# Altium schematic symbol library PTZ.SchLib: 104 symbols (part 1 of 4)
Pins are listed as number, name and electrical type; pins without a type are passive.

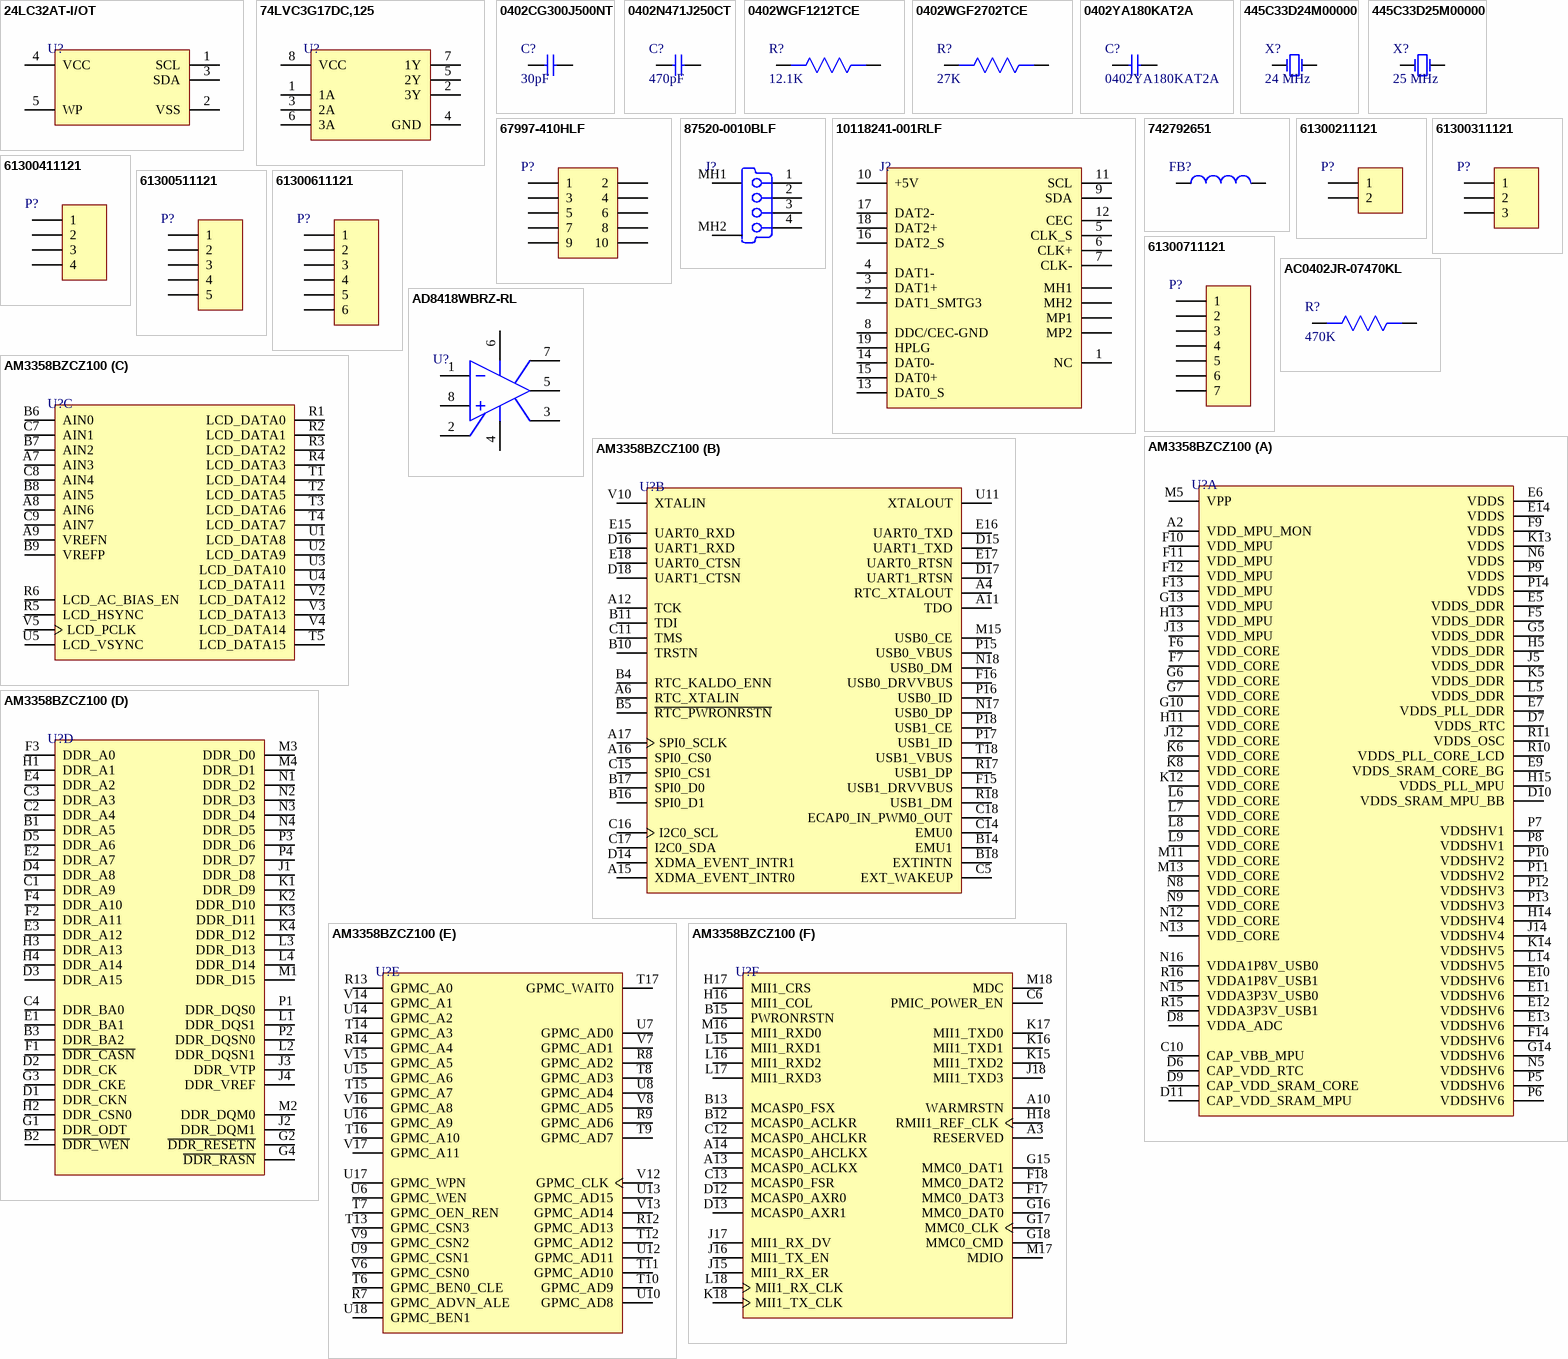
[diagram p0: symbols 24LC32AT-I/OT to AM3358BZCZ100]

## 24LC32AT-I/OT
designator U?
IC EEPROM 32KBIT 400KHZ SOT23-5; Manufacturer: Microchip; Manufacturer Part Number: 24LC32AT-I/OT; Min Supply Voltage: 2.5V; Max Supply Voltage: 5.5V; Interface: I2C,Serial; Access Time: 900ns; Density: 32Kb; Nominal Supply Current: 3mA; Organization: 4KX8; Write Protection: YES; Write Cycle Time-Max (tWC): 5ms; Operating Supply Voltage: 5V; Supplier 1: Newark; RoHS: Yes; Category: EEPROM; Pricing 1: 1=0.43000, 25=0.42400, 50=0.42200, 100=0.42000 (USD); Mount: Surface Mount; Case/Package: SOT-23; Number of Pins: 5; Contact Plating: Tin,Matte; Min Operating Temperature: -40°C; Max Operating Temperature: 85°C; Frequency: 400kHz; Packaging: Tape and Reel; Package Quantity: 3000; Memory Type: EEPROM; Memory Size: 32Kb; Max Frequency: 400kHz; Access Time-Max: 900ns; Programming Voltage: 5.5V; Supply Current: 3mA; Supply Voltage-Nom: 5.5V; Termination: SMD/SMT; Length: 3.1mm; Width: 1.8mm; Height: 1.3mm; Radiation Hardening: No; REACH SVHC: No SVHC; Lead Free: Lead Free; RoHS Compliant: Yes; ComponentLink1URL: https://datasheet.ciiva.com/1155/1688094-1155269.pdf?src-supplier=Element14; ComponentLink1Description: https://datasheet.ciiva.com/1155/1688094-1155269.pdf?src-supplier=Element14; ComponentLink2URL: https://datasheet.ciiva.com/22715/1669362-22715182.pdf?src-supplier=Element14; ComponentLink2Description: https://datasheet.ciiva.com/22715/1669362-22715182.pdf?src-supplier=Element14; ComponentLink3URL: https://datasheet.ciiva.com/14134/24aa32a-24lc32a-eng-tds-14134837.pdf?src-supplier=Distrelec; ComponentLink3Description: https://datasheet.ciiva.com/14134/24aa32a-24lc32a-eng-tds-14134837.pdf?src-supplier=Distrelec; ComponentLink4URL: https://datasheet.ciiva.com/46410/1669362-46410953.pdf?src-supplier=Element14; ComponentLink4Description: https://datasheet.ciiva.com/46410/1669362-46410953.pdf?src-supplier=Element14; ComponentLink5URL: https://datasheet.ciiva.com/16221/filehandler-aspxddocname-en011853-16221753.pdf?src-supplier=Future+Electronics; ComponentLink5Description: https://datasheet.ciiva.com/16221/filehandler-aspxddocname-en011853-16221753.pdf?src-supplier=Future+Electronics; ComponentLink6URL: https://datasheet.ciiva.com/26910/getdatasheetpartid-757926-26910554.pdf?src-supplier=Verical; ComponentLink6Description: https://datasheet.ciiva.com/26910/getdatasheetpartid-757926-26910554.pdf?src-supplier=Verical; Supplier Part Number 1: 08P0113
footprint SOT-23-5
pins: 1 SCL, 2 VSS, 3 SDA, 4 VCC, 5 WP

## 74LVC3G17DC,125
designator U?
IC BUFF SCHMT TRG TRPL 8VSSOP; Manufacturer: NXP Semiconductors; Manufacturer Part Number: 74LVC3G17DC125; Max Supply Voltage: 5.5V; Min Supply Voltage: 1.65V; Propagation Delay: 13.1ns; Low Level Output Current: 32mA; Number of Input Lines: 3; Polarity: Non-Inverting; Logic Function: Schmitt Trigger,Buffer; Number of Bits per Element: 1; Quiescent Current: 40uA; Supplier 1: Digi-Key; RoHS: Yes; Category: Clock Buffers, Drivers; Mount: Surface Mount; Case/Package: VSSOP; Number of Pins: 8; Contact Plating: Gold; Min Operating Temperature: -40°C; Max Operating Temperature: 125°C; Packaging: Tape and Reel; Package Quantity: 3000; Number of Output Lines: 3; High Level Output Current: 32mA; Number of Channels: 3; Number of Inputs: 3; Number of Outputs: 3; Number of Elements: 3; Turn-On Delay Time: 13.1ns; Series: 74LVC; Technology: CMOS; Radiation Hardening: No; Lead Free: Lead Free; ComponentLink1URL: https://datasheet.ciiva.com/1839/74lvc3g17-1839116.pdf?src-supplier=Digi-Key; ComponentLink1Description: https://datasheet.ciiva.com/1839/74lvc3g17-1839116.pdf?src-supplier=Digi-Key; ComponentLink2URL: https://datasheet.ciiva.com/1839/74lvc3g17-1839115.pdf?src-supplier=Digi-Key; ComponentLink2Description: https://datasheet.ciiva.com/1839/74lvc3g17-1839115.pdf?src-supplier=Digi-Key; ComponentLink3URL: https://datasheet.ciiva.com/1839/74lvc3g17-1839117.pdf?src-supplier=Digi-Key; ComponentLink3Description: https://datasheet.ciiva.com/1839/74lvc3g17-1839117.pdf?src-supplier=Digi-Key; ComponentLink4URL: https://datasheet.ciiva.com/8260/74lvc3g17-8260965.pdf?src-supplier=Avnet; ComponentLink4Description: https://datasheet.ciiva.com/8260/74lvc3g17-8260965.pdf?src-supplier=Avnet; Supplier Part Number 1: 568-9369-2-ND
footprint 8-VSSOP
pins: 1 1A, 2 3Y, 3 2A, 4 GND, 5 2Y, 6 3A, 7 1Y, 8 VCC

## 0402CG300J500NT
designator C?, comment 30pF
50V 30pF C0G ±5% 0402 SMD/SMT ROHS; Manufacturer: FH; Manufacturer Part Number: 0402CG300J500NT; Footprint: 0402; Value: 30pF; ComponentLink1Description: LCSC; ComponentLink1URL: https://lcsc.com/product-detail/Multilayer-Ceramic-Capacitors-MLCC-SMD-SMT_FH-Guangdong-Fenghua-Advanced-Tech-0402CG300J500NT_C1570.html
footprint Cap0402
pins: 1, 2

## 0402N471J250CT
designator C?, comment 470pF
25V 470pF NP0 ±5% 0402 SMD/SMT ROHS; Manufacturer: Walsin; Manufacturer Part Number: 0402N471J250CT; Footprint: 0402
footprint Cap0402
pins: 1, 2

## 0402WGF1212TCE
designator R?, comment 12.1K
62.5mW Thick Film Resistors 50V 12.1kΩ 0402 ROHS; Manufacturer: UNI-ROYAL; Manufacturer Part Number: 0402WGF1212TCE; Footprint: 0402; ComponentLink1Description: LCSC; ComponentLink1URL: https://lcsc.com/product-detail/Chip-Resistor-Surface-Mount_UNI-ROYAL-Uniroyal-Elec-0402WGF1212TCE_C25852.html; Value: 12.1K
footprint Res0402
pins: 1, 2

## 0402WGF2702TCE
designator R?, comment 27K
62.5mW T 50V 27kΩ 0402  ROHS; Manufacturer: Royal Electronic Factory; Manufacturer Part Number: 0402WGF2702TCE; Supplier 1: Mouser; RoHS: No; Stock 1: 200000; Pricing 1: 10000=0.00400 (USD); Supplier Part Number 1: 303-0402WGF2702TCE
footprint Res0402
pins: 1, 2

## 0402YA180KAT2A
designator C?
CAP CER 18PF 16V NP0 0402; Manufacturer: Kyocera AVX; Tolerance: 10%; Dielectric: C0G; Supplier 1: Digi-Key; Manufacturer Part Number: 0402YA180KAT2A; RoHS: Yes; Category: Ceramic Capacitors; Stock 1: 28789; Pricing 1: 1=0.10000, 10=0.03000, 50=0.01640, 100=0.01350, 500=0.00962, 1000=0.00756, 2500=0.00688, 5000=0.00632 (USD); Mount: Surface Mount; Case/Package: 0402; Number of Pins: 2; Case Code (Metric): 1005; Case Code (Imperial): 0402; Weight: 2.3E-05oz; Min Operating Temperature: -55°C; Max Operating Temperature: 125°C; Capacitance: 18pF; Voltage Rating: 16V; Packaging: Tape and Reel; Package Quantity: 10000; Voltage Rating (DC): 16V; Termination: SMD/SMT; Length: 1mm; Width: 0.02inch; Height: 0.56mm; Thickness: 0.022inch; Depth: 0.5mm; Radiation Hardening: No; REACH SVHC: Unknown; ComponentLink1URL: https://datasheet.ciiva.com/206/ccog-206568.pdf?src-supplier=Digi-Key; ComponentLink1Description: https://datasheet.ciiva.com/206/ccog-206568.pdf?src-supplier=Digi-Key; ComponentLink2URL: https://datasheet.ciiva.com/5444/ccog-243403-5444889.pdf?src-supplier=Mouser; ComponentLink2Description: https://datasheet.ciiva.com/5444/ccog-243403-5444889.pdf?src-supplier=Mouser; ComponentLink3URL: https://datasheet.ciiva.com/11568/ccog-11568446.pdf?src-supplier=Avnet; ComponentLink3Description: https://datasheet.ciiva.com/11568/ccog-11568446.pdf?src-supplier=Avnet; Supplier Part Number 1: 478-0402YA180KAT2ACT-ND
footprint Cap0402
pins: 1, 2

## 445C33D24M00000
designator X?, comment 24 MHz
CRYSTAL 24.0000MHZ 18PF SMD; Manufacturer: CTS; Manufacturer Part Number: 445C33D24M00000; ESR (Equivalent Series Resistance): 40R; Frequency: 24MHz; Tolerance: 30ppm; Supplier 1: Avnet; RoHS: Yes; Category: Crystals; Stock 1: 20000; Pricing 1: 1000=0.32918, 2000=0.32482, 4000=0.30956, 6000=0.26496, 8000=0.25920, 10000=0.23100, 100000=0.22575 (USD); Mount: Surface Mount; Case/Package: SMD/SMT; Number of Pins: 2; Contact Plating: Gold; Min Operating Temperature: -20°C; Max Operating Temperature: 70°C; Load Capacitance: 18pF; Package Quantity: 1000; Packaging: Tape and Reel; Frequency Tolerance: 30ppm; Frequency Stability: 30ppm; Termination: SMD/SMT; Series Resistance: 40R; Series: 445; Length: 0.197inch; Width: 3.2mm; Height: 0.053inch; RoHS Compliant: Yes; ComponentLink1URL: https://datasheet.ciiva.com/29893/008-0360-0-29893750.pdf?src-supplier=Avnet; ComponentLink1Description: https://datasheet.ciiva.com/29893/008-0360-0-29893750.pdf?src-supplier=Avnet; Supplier Part Number 1: 445C33D24M00000
footprint 445C33D24M00000
pins: 1, 2 Out/IN

## 445C33D25M00000
designator X?, comment 25 MHz
CRYSTAL 25.0000MHZ 18PF SMD; Manufacturer: CTS; Manufacturer Part Number: 445C33D25M00000; Frequency: 25MHz; Frequency Tolerance: 30ppm; ESR (Equivalent Series Resistance): 40R; Supplier 1: Mouser; RoHS: Yes; Category: Crystals; Stock 1: 5341; Pricing 1: 1=0.58000, 10=0.48000, 50=0.48000, 100=0.38400, 1000=0.30700, 10000=0.30700 (USD); Mount: Surface Mount; Case/Package: SMD/SMT; Number of Pins: 2; Contact Plating: Gold; Min Operating Temperature: -20°C; Max Operating Temperature: 70°C; Package Quantity: 1000; Load Capacitance: 18pF; Packaging: Tape and Reel; Tolerance: 30ppm; Frequency Stability: 30ppm; Termination: SMD/SMT; Series Resistance: 40R; Series: 445; Length: 0.197inch; Width: 0.126inch; Height: 0.053inch; Lead Free: Lead Free; RoHS Compliant: Yes; ComponentLink1URL: https://datasheet.ciiva.com/29893/008-0360-0-29893752.pdf?src-supplier=Avnet; ComponentLink1Description: https://datasheet.ciiva.com/29893/008-0360-0-29893752.pdf?src-supplier=Avnet; Supplier Part Number 1: 774-445C33D25M00000
footprint 445C33D25M00000
pins: 1, 2 Out/IN

## 67997-410HLF
designator P?
CONN HEADER VERT 10POS 2.54MM; Manufacturer: Amphenol FCI; Manufacturer Part Number: 67997-410HLF; Number of Contacts: 10; Current Rating: 3A; Voltage Rating: 1.5kV; Insulation Resistance: 5GR; Gender: Male; Connector Type: Male Pin; Contact Post Length: 3.05mm; Row Spacing: 0.1inch; Supplier 1: Digi-Key; Stock 1: 7926; Pricing 1: 1=0.28, 10=0.266, 100=0.1864, 500=0.15982, 1000=0.13318, 5000=0.11415, 10000=0.10654 (USD); Mount: Through Hole; Contact Plating: Tin; Contact Material: Bronze; Color: Black; Housing Color: Black; Housing Material: Thermoplastic; Min Operating Temperature: -65°C; Max Operating Temperature: 125°C; Number of Rows: 2; Termination: Solder; Contact Gender: Male; Package Quantity: 100; Packaging: Bulk; Number of Positions: 10; Max Voltage Rating (AC): 1.5kV; Orientation: Straight; Length: 12.7mm; Pitch: 2.54mm; Contact Mating Length: 0.23inch; Depth: 4.83mm; REACH SVHC: No SVHC; Flammability Rating: UL94 V-0; ComponentLink1URL: http://www.mouser.com/ds/2/154/bus-12-050-356030.pdf?src-supplier=Mouser; ComponentLink1Description: http://www.mouser.com/ds/2/154/bus-12-050-356030.pdf?src-supplier=Mouser; ComponentLink2URL: http://portal.fciconnect.com/Comergent/fci/drawing/67996.pdf?src-supplier=Avnet; ComponentLink2Description: http://portal.fciconnect.com/Comergent/fci/drawing/67996.pdf?src-supplier=Avnet; ComponentLink3URL: https://www.alliedelec.com/m/d/738c41368b909dba4b47243c40762f88.pdf?src-supplier=Allied+Electronics; ComponentLink3Description: https://www.alliedelec.com/m/d/738c41368b909dba4b47243c40762f88.pdf?src-supplier=Allied+Electronics; ComponentLink4URL: https://cdn.amphenol-icc.com/media/wysiwyg/files/drawing/67996.pdf?src-supplier=Digi-Key; ComponentLink4Description: https://cdn.amphenol-icc.com/media/wysiwyg/files/drawing/67996.pdf?src-supplier=Digi-Key; ComponentLink5URL: http://portal.fciconnect.com/Comergent/fci/drawing/67996.pdf?src-supplier=Avnet+Europe; ComponentLink5Description: http://portal.fciconnect.com/Comergent/fci/drawing/67996.pdf?src-supplier=Avnet+Europe; ComponentLink6URL: http://www.farnell.com/datasheets/1748781.pdf?src-supplier=Element14; ComponentLink6Description: http://www.farnell.com/datasheets/1748781.pdf?src-supplier=Element14; Supplier Part Number 1: 609-3243-ND
footprint HDR2X5 (Connector; Header; 5x2 Position)
pins: 1, 2, 3, 4, 5, 6, 7, 8, 9, 10

## 87520-0010BLF
designator J?
CONN RCPT USB2.0 TYPEA 4POS R/A; Manufacturer: Amphenol ICC / FCI; Manufacturer Part Number: 87520-0010BLF; Supplier 1: Newark; RoHS: No; Category: USB Connectors; Supplier Part Number 1: 08X5249
footprint 87520-0010BLF
pins: 1 V BUS (5V) "USB Vcc [Red]", 2 D- "USB Data - [White]", 3 D+ "USB Data + [Green]", 4 GND "Not Connected (or joined to pin 5 via resistor)", MH1 Tab "Shell", MH2 Tab "Shell"

## 10118241-001RLF
designator J?
CONN RCP MICRO HDMI 19POS SMD RA; Manufacturer: Amphenol ICC / FCI; Manufacturer Part Number: 10118241-001RLF; Supplier 1: Mouser; RoHS: Yes; Category: Audio / Video Connectors; Stock 1: 4894; Pricing 1: 1=1.44000, 10=1.18000, 50=1.18000, 100=1.12000, 1000=0.79700, 10000=0.76000 (USD); ComponentLink1URL: https://datasheet.ciiva.com/1095/10118241-1095058.pdf?src-supplier=Element14; ComponentLink1Description: https://datasheet.ciiva.com/1095/10118241-1095058.pdf?src-supplier=Element14; ComponentLink2URL: https://datasheet.ciiva.com/851/10118241-851179.pdf?src-supplier=Digi-Key; ComponentLink2Description: https://datasheet.ciiva.com/851/10118241-851179.pdf?src-supplier=Digi-Key; ComponentLink3URL: https://datasheet.ciiva.com/851/10118241-851180.pdf?src-supplier=Digi-Key; ComponentLink3Description: https://datasheet.ciiva.com/851/10118241-851180.pdf?src-supplier=Digi-Key; ComponentLink4URL: https://datasheet.ciiva.com/851/10118241-851181.pdf?src-supplier=Digi-Key; ComponentLink4Description: https://datasheet.ciiva.com/851/10118241-851181.pdf?src-supplier=Digi-Key; Supplier Part Number 1: 649-10118241-001RLF
footprint 10118241-001RLF
pins: 1 NC, 2 DAT1_SMTG3, 3 DAT1+, 4 DAT1-, 5 CLK_S, 6 CLK+, 7 CLK-, 8 DDC/CEC-GND, 9 SDA, 10 +5V, 11 SCL, 12 CEC, 13 DAT0_S, 14 DAT0-, 15 DAT0+, 16 DAT2_S, 17 DAT2-, 18 DAT2+, 19 HPLG, MH1, MH2, MP1, MP2

## 742792651
designator FB?
Ferrite Beads WE-CBF 0603 SMD Bead 100MHz 600Ohm 1000mA; Manufacturer: Wurth Electronics; Manufacturer Part Number: 742792651; Tolerance: 25%; Current Rating: 1A; Impedance: 600R; Number of Lines: 1; DC Resistance (DCR): 200mR; Inductance: 0.36H; Supplier 1: RSComponents; RoHS: Yes; Category: Ferrite Beads and Chips; Stock 1: 6200; Pricing 1: 50=0.13400, 500=0.12400, 2500=0.11200, 5000=0.10000, 12500=0.09000 (GBP); Mount: Surface Mount; Case/Package: SMD/SMT; Case Code (Metric): 1608; Case Code (Imperial): 0603; Material: Ferrite; Core Material: Ferrite; Weight: 0.000141oz; Min Operating Temperature: -55°C; Max Operating Temperature: 125°C; Package Quantity: 1; Packaging: Tape and Reel; Max Current Rating: 1A; Max DC Current: 1A; Termination: SMD/SMT; Test Frequency: 100MHz; Series: WE-CBF; Resistance: 200mR; Length: 1.6mm; Width: 0.8mm; Height: 0.8mm; Depth: 0.8mm; REACH SVHC: Unknown; RoHS Compliant: Yes; Lead Free: Lead Free; ComponentLink1URL: https://datasheet.ciiva.com/1475/1705833-1475349.pdf?src-supplier=Farnell; ComponentLink1Description: https://datasheet.ciiva.com/1475/1705833-1475349.pdf?src-supplier=Farnell; ComponentLink2URL: https://datasheet.ciiva.com/11803/0900766b80d2e079-11803680.pdf?src-supplier=RSComponents; ComponentLink2Description: https://datasheet.ciiva.com/11803/0900766b80d2e079-11803680.pdf?src-supplier=RSComponents; ComponentLink3URL: https://datasheet.ciiva.com/4940/742792651-72243-4940492.pdf?src-supplier=Mouser; ComponentLink3Description: https://datasheet.ciiva.com/4940/742792651-72243-4940492.pdf?src-supplier=Mouser; ComponentLink4URL: https://datasheet.ciiva.com/1013/742792651-1013527.pdf?src-supplier=Digi-Key; ComponentLink4Description: https://datasheet.ciiva.com/1013/742792651-1013527.pdf?src-supplier=Digi-Key; ComponentLink5URL: https://datasheet.ciiva.com/22711/1705833-22711420.pdf?src-supplier=Element14; ComponentLink5Description: https://datasheet.ciiva.com/22711/1705833-22711420.pdf?src-supplier=Element14; ComponentLink6URL: https://datasheet.ciiva.com/1013/742792651-1013528.pdf?src-supplier=Digi-Key; ComponentLink6Description: https://datasheet.ciiva.com/1013/742792651-1013528.pdf?src-supplier=Digi-Key; ComponentLink7URL: https://datasheet.ciiva.com/1013/742792651-1013529.pdf?src-supplier=Digi-Key; ComponentLink7Description: https://datasheet.ciiva.com/1013/742792651-1013529.pdf?src-supplier=Digi-Key; Supplier Part Number 1: 1241835
footprint IND 0603
pins: 1, 2

## 61300211121
designator P?
CONN HEADER VERT 2POS 2.54MM; Manufacturer: Wurth Electronics; Manufacturer Part Number: 61300211121; Current Rating: 3A; Voltage Rating: 250V; Number of Positions: 2; Gender: Male; Connector Type: Male Pin; Pitch: 0.1inch; Supplier 1: Digi-Key; Stock 1: 219205; Pricing 1: 1=0.13, 10=0.106, 25=0.088, 50=0.074, 100=0.067, 1000=0.061 (USD); Mount: Through Hole; Contact Plating: Gold; Housing Material: PBT; Contact Material: Copper Alloy,Copper; Color: Black; Min Operating Temperature: -40°C; Max Operating Temperature: 125°C; Number of Rows: 1; Contact Gender: Male; Packaging: Bulk; Termination: Through Hole; Number of Contacts: 2; Contact Mating Length: 0.236inch; REACH SVHC: Unknown; Lead Free: Lead Free; ComponentLink1URL: http://www.mouser.com/ds/2/445/6130xx11121-538006.pdf?src-supplier=Mouser; ComponentLink1Description: http://www.mouser.com/ds/2/445/6130xx11121-538006.pdf?src-supplier=Mouser; Supplier Part Number 1: 732-5315-ND
footprint HDR1X2 (CONN HEADER VERT 2POS 2.54MM)
pins: 1, 2

## 61300311121
designator P?
CONN HEADER VERT 3POS 2.54MM; Manufacturer: Wurth Electronics; Manufacturer Part Number: 61300311121; Number of Positions: 3; Gender: Male; Connector Type: Male Pin; Pitch: 0.1inch; Supplier 1: Digi-Key; Stock 1: 81286; Pricing 1: 1=0.13, 10=0.106, 25=0.088, 50=0.074, 100=0.067, 1000=0.061 (USD); Mount: Through Hole; Contact Plating: Gold; Contact Material: Copper; Color: Black; Number of Rows: 1; Packaging: Bulk; Termination: Solder; Number of Contacts: 3; Contact Mating Length: 0.236inch; REACH SVHC: Unknown; Lead Free: Lead Free; ComponentLink1URL: http://www.farnell.com/cad/1737268.pdf?src-supplier=Element14; ComponentLink1Description: http://www.farnell.com/cad/1737268.pdf?src-supplier=Element14; ComponentLink2URL: https://katalog.we-online.de/em/datasheet/6130xx11121.pdf?src-supplier=Digi-Key; ComponentLink2Description: https://katalog.we-online.de/em/datasheet/6130xx11121.pdf?src-supplier=Digi-Key; Supplier Part Number 1: 732-5316-ND
footprint HDR1X3 (Connector; Header; 3 Position)
pins: 1, 2, 3

## 61300411121
designator P?
CONN HEADER VERT 4POS 2.54MM; Manufacturer: Wurth Electronics; Manufacturer Part Number: 61300411121; Number of Positions: 4; Gender: Male; Connector Type: Male Pin; Pitch: 0.1inch; Supplier 1: Digi-Key; Stock 1: 20544; Pricing 1: 1=0.18, 10=0.153, 25=0.1272, 50=0.106, 100=0.096, 1000=0.088 (USD); Mount: Through Hole; Contact Plating: Gold; Contact Material: Copper; Color: Black; Number of Rows: 1; Packaging: Bulk; Termination: Solder; Number of Contacts: 4; Contact Mating Length: 0.236inch; REACH SVHC: Unknown; Lead Free: Lead Free; ComponentLink1URL: http://www.farnell.com/cad/1737268.pdf?src-supplier=Element14; ComponentLink1Description: http://www.farnell.com/cad/1737268.pdf?src-supplier=Element14; ComponentLink2URL: https://katalog.we-online.de/em/datasheet/6130xx11121.pdf?src-supplier=Digi-Key; ComponentLink2Description: https://katalog.we-online.de/em/datasheet/6130xx11121.pdf?src-supplier=Digi-Key; Supplier Part Number 1: 732-5317-ND
footprint HDR1X4 (Connector; Header; 4 Position)
pins: 1, 2, 3, 4

## 61300511121
designator P?
CONN HEADER VERT 5POS 2.54MM; Manufacturer: Wurth Electronics; Manufacturer Part Number: 61300511121; Number of Positions: 5; Gender: Male; Connector Type: Male Pin; Pitch: 0.1inch; Supplier 1: Digi-Key; Stock 1: 27960; Pricing 1: 1=0.25, 10=0.209, 25=0.174, 50=0.145, 100=0.132, 1000=0.12 (USD); Mount: Through Hole; Contact Plating: Gold; Contact Material: Copper; Color: Black; Number of Rows: 1; Packaging: Bulk; Termination: Solder; Number of Contacts: 5; Contact Mating Length: 0.236inch; REACH SVHC: Unknown; Lead Free: Lead Free; ComponentLink1URL: https://katalog.we-online.de/em/datasheet/6130xx11121.pdf?src-supplier=Digi-Key; ComponentLink1Description: https://katalog.we-online.de/em/datasheet/6130xx11121.pdf?src-supplier=Digi-Key; ComponentLink2URL: http://www.farnell.com/cad/1737268.pdf?src-supplier=Element14; ComponentLink2Description: http://www.farnell.com/cad/1737268.pdf?src-supplier=Element14; Supplier Part Number 1: 732-5318-ND
footprint HDR1X5 (Connector; Header; 5 Position)
pins: 1, 2, 3, 4, 5

## 61300611121
designator P?
CONN HEADER 6 POS 2.54; Manufacturer: Wurth Electronics; Manufacturer Part Number: 61300611121; Current Rating: 3A; Voltage Rating: 250V; Number of Positions: 6; Gender: Male; Connector Type: Male Pin; Pitch: 0.1inch; Supplier 1: Newark; RoHS: Yes; Category: Headers and Wire Housings; Stock 1: 4996; Pricing 1: 1=0.34000, 10=0.28900, 25=0.24000, 50=0.20100, 100=0.18200 (USD); Mount: Through Hole; Contact Plating: Gold; Contact Material: Copper Alloy,Copper; Housing Material: PBT; Color: Black; Min Operating Temperature: -40°C; Max Operating Temperature: 125°C; Number of Rows: 1; Contact Gender: Male; Packaging: Bulk; Termination: Through Hole; Number of Contacts: 6; Series: WR-PHD; Contact Type: Male Pin; Contact Mating Length: 0.236inch; REACH SVHC: Unknown; Lead Free: Lead Free; RoHS Compliant: Yes; ComponentLink1URL: http://www.mouser.com/ds/2/445/6130xx11121-538006.pdf?src-supplier=Mouser; ComponentLink1Description: http://www.mouser.com/ds/2/445/6130xx11121-538006.pdf?src-supplier=Mouser; ComponentLink2URL: http://www.farnell.com/cad/1737268.pdf?src-supplier=Element14; ComponentLink2Description: http://www.farnell.com/cad/1737268.pdf?src-supplier=Element14; ComponentLink3URL: https://katalog.we-online.de/em/datasheet/6130xx11121.pdf?src-supplier=Digi-Key; ComponentLink3Description: https://katalog.we-online.de/em/datasheet/6130xx11121.pdf?src-supplier=Digi-Key; Supplier Part Number 1: 20X0957
footprint HDR1X6 (Connector; Header; 6 Position)
pins: 1, 2, 3, 4, 5, 6

## 61300711121
designator P?
CONN HEADER VERT 7POS 2.54MM; Manufacturer: Wurth Electronics; Manufacturer Part Number: 61300711121; Number of Positions: 7; Gender: Male; Connector Type: Male Pin; Pitch: 0.1inch; Supplier 1: Digi-Key; Stock 1: 4017; Pricing 1: 1=0.37, 10=0.315, 25=0.2632, 50=0.219, 100=0.199, 1000=0.181 (USD); Mount: Through Hole; Contact Plating: Gold; Contact Material: Copper; Color: Black; Number of Rows: 1; Packaging: Bulk; Termination: Solder; Number of Contacts: 7; Contact Mating Length: 0.236inch; REACH SVHC: Unknown; ComponentLink1URL: https://katalog.we-online.de/em/datasheet/6130xx11121.pdf?src-supplier=Digi-Key; ComponentLink1Description: https://katalog.we-online.de/em/datasheet/6130xx11121.pdf?src-supplier=Digi-Key; Supplier Part Number 1: 732-5320-ND
footprint HDR1X7 (Connector; Header; 7 Position)
pins: 1, 2, 3, 4, 5, 6, 7

## AC0402JR-07470KL
designator R?, comment 470K
RES SMD 470K OHM 5% 1/16W 0402; Manufacturer: Yageo; Manufacturer Part Number: AC0402JR-07470KL; Resistance: 470kR; Max Power Dissipation: 63mW; Temperature Coefficient: 100ppm/°C; Supplier 1: Mouser; RoHS: Yes; Category: Chip SMD Resistors; Stock 1: 42207; Pricing 1: 1=0.10000, 10=0.02000, 50=0.02000, 100=0.00900, 1000=0.00500, 10000=0.00400 (USD); Case/Package: 0402; Case Code (Metric): 1005; Case Code (Imperial): 0402; Min Operating Temperature: -55°C; Max Operating Temperature: 155°C; Packaging: Tape and Reel; Resistor Type: Thick Film; Number of Terminations: 2; Tolerance: 5%; Features: Moisture Resistant,Automotive AEC-Q200; Length: 0.039inch; Width: 0.02inch; Height: 0.015inch; RoHS Compliant: Yes; ComponentLink1URL: http://www.yageo.com/NewPortal/yageodocoutput?fileName=/pdf/R-Chip/PYu-AC_51_RoHS_L_6.pdf&src-supplier=Digi-Key; ComponentLink1Description: http://www.yageo.com/NewPortal/yageodocoutput?fileName=/pdf/R-Chip/PYu-AC_51_RoHS_L_6.pdf&src-supplier=Digi-Key; ComponentLink2URL: https://www.yageo.com/upload/media/product/productsearch/datasheet/rchip/PYu-AC_51_RoHS_L_7.pdf?src-supplier=Digi-Key; ComponentLink2Description: https://www.yageo.com/upload/media/product/productsearch/datasheet/rchip/PYu-AC_51_RoHS_L_7.pdf?src-supplier=Digi-Key; Supplier Part Number 1: 603-AC0402JR-07470KL
footprint Res0402
pins: 1, 2

## AD8418WBRZ-RL
designator U?
IC CURRENT SENSE 1 CIRCUIT 8SOIC; Manufacturer: Analog Devices; Manufacturer Part Number: AD8418WBRZ-RL; Input Capacitance: 2pF; Common Mode Rejection Ratio: 90dB; Min Supply Voltage: 2.7V; Max Supply Voltage: 5.5V; Min Dual Supply Voltage: 1.35V; Max Dual Supply Voltage: 2.75V; Number of Circuits: 1; Slew Rate: 1V/µs; -3db Bandwidth: 250kHz; Input Offset Voltage (Vos): 200uV; Operating Supply Current: 2.6mA; Power Supply Rejection Ratio (PSRR): 80dB; Supplier 1: Mouser; RoHS: Yes; Category: Power Management ICs; Pricing 1: 1=3.18000, 10=2.86000, 25=2.70000, 50=2.70000, 100=2.34000, 250=2.22000, 500=1.99000, 1000=1.70000, 2500=1.69000, 10000=1.69000 (USD); Mount: Surface Mount; Case/Package: SOIC; Number of Pins: 8; Contact Plating: Tin,Matte; Min Operating Temperature: -40°C; Max Operating Temperature: 125°C; Packaging: Tape and Reel; Lead Free: Contains Lead; ComponentLink1URL: https://datasheet.ciiva.com/30008/ad8418-30008109.pdf?src-supplier=Avnet; ComponentLink1Description: https://datasheet.ciiva.com/30008/ad8418-30008109.pdf?src-supplier=Avnet; Supplier Part Number 1: 584-AD8418WBRZ-RL
footprint SOIC-8
pins: 1 IN-, 2 GND, 3 VREF2, 4 NC, 5 OUT, 6 VS (power), 7 VREF1, 8 IN+

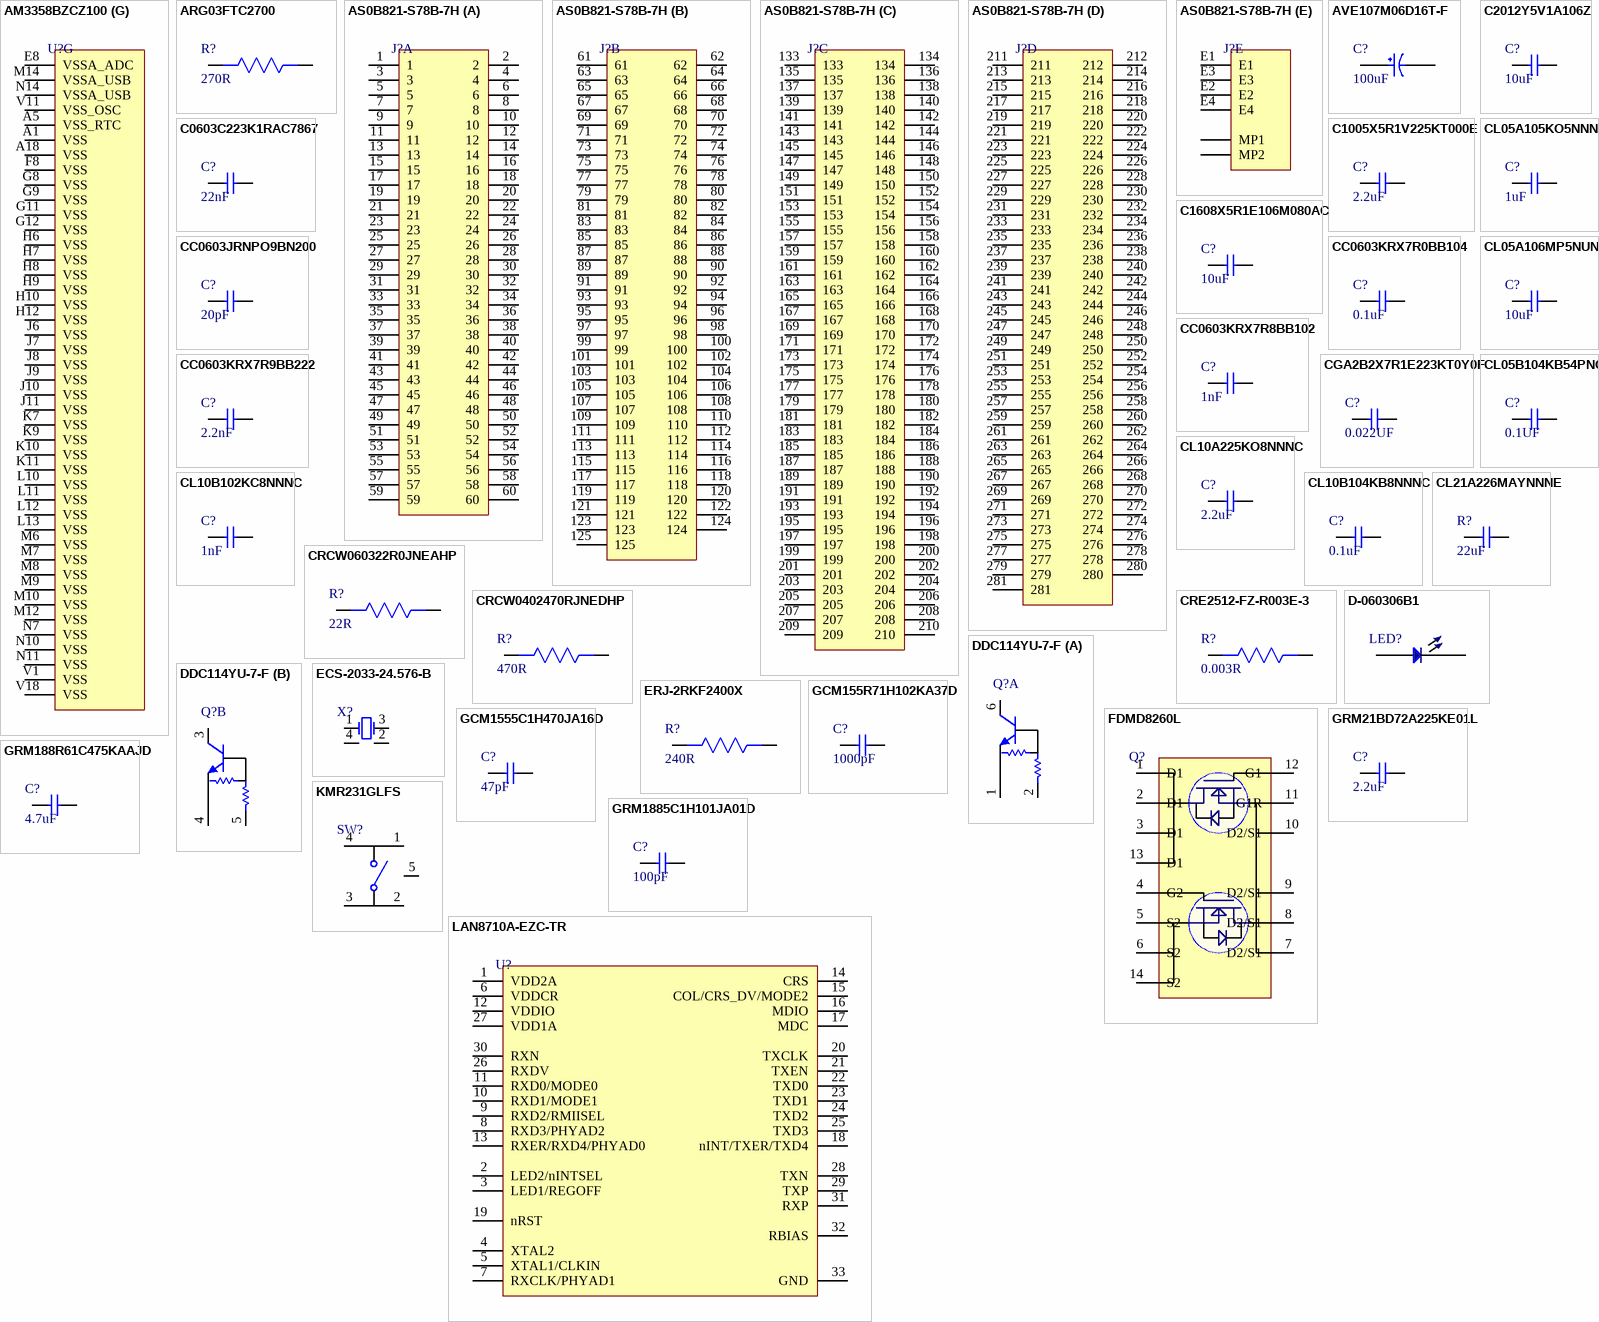
[diagram p1: symbols AM3358BZCZ100 to LAN8710A-EZC-TR]

## AM3358BZCZ100
designator U?
IC MPU SITARA 1.0GHZ 324NFBGA; Manufacturer: Texas Instruments; Manufacturer Part Number: AM3358BZCZ100; Interface: I2C,SPI,USB,CAN,Ethernet,UART; RAM Size: 64KB; Core Architecture: ARM; Min Supply Voltage: 912mV; Max Supply Voltage: 1.378V; Frequency: 1GHz; Data Bus Width: 32b; Voltage: 1.144V; Number of UART Channels: 6; Memory Type: ROM,RAM,Cache; Number of Cores: 1; Supplier 1: Mouser; RoHS: Yes; Category: Microprocessors; Pricing 1: 1=20.17000, 10=18.57000, 25=17.80000, 50=17.80000, 100=15.68000, 252=14.90000, 504=13.94000, 1000=13.94000, 1008=12.82000, 2520=12.33000, 10000=13.94000 (USD); Case/Package: BGA; Number of Pins: 324; Weight: 0.060453oz; Contact Plating: Copper,Tin,Silver; Min Operating Temperature: -40°C; Max Operating Temperature: 105°C; Package Quantity: 126; Packaging: Tray; Max Frequency: 1GHz; Length: 15.1mm; Width: 15.1mm; Height: 0.96mm; Radiation Hardening: No; REACH SVHC: No SVHC; Lead Free: Lead Free; RoHS Compliant: Yes; ComponentLink1URL: https://datasheet.ciiva.com/26910/getdatasheetpartid-746264-26910415.pdf?src-supplier=Verical; ComponentLink1Description: https://datasheet.ciiva.com/26910/getdatasheetpartid-746264-26910415.pdf?src-supplier=Verical; ComponentLink2URL: https://datasheet.ciiva.com/41793/1707549-41793770.pdf?src-supplier=Farnell; ComponentLink2Description: https://datasheet.ciiva.com/41793/1707549-41793770.pdf?src-supplier=Farnell; ComponentLink3URL: https://datasheet.ciiva.com/22636/1707549-22636037.pdf?src-supplier=Element14; ComponentLink3Description: https://datasheet.ciiva.com/22636/1707549-22636037.pdf?src-supplier=Element14; ComponentLink4URL: https://datasheet.ciiva.com/22636/1885783-22636009.pdf?src-supplier=Element14; ComponentLink4Description: https://datasheet.ciiva.com/22636/1885783-22636009.pdf?src-supplier=Element14; ComponentLink5URL: https://datasheet.ciiva.com/29882/am3352-29882254.pdf?src-supplier=Avnet; ComponentLink5Description: https://datasheet.ciiva.com/29882/am3352-29882254.pdf?src-supplier=Avnet; Supplier Part Number 1: 595-AM3358BZCZ100
footprint 324-NFBGA (15x15)
part A pins: A2 VDD_MPU_MON, C10 CAP_VBB_MPU, D6 CAP_VDD_RTC, D7 VDDS_RTC, D8 VDDA_ADC, D9 CAP_VDD_SRAM_CORE, D10 VDDS_SRAM_MPU_BB, D11 CAP_VDD_SRAM_MPU, E5 VDDS_DDR, E6 VDDS, E7 VDDS_PLL_DDR, E9 VDDS_SRAM_CORE_BG, E10 VDDSHV6, E11 VDDSHV6, E12 VDDSHV6, E13 VDDSHV6, E14 VDDS, F5 VDDS_DDR, F6 VDD_CORE, F7 VDD_CORE, F9 VDDS, F10 VDD_MPU, F11 VDD_MPU, F12 VDD_MPU, F13 VDD_MPU, F14 VDDSHV6, G5 VDDS_DDR, G6 VDD_CORE, G7 VDD_CORE, G10 VDD_CORE, G13 VDD_MPU, G14 VDDSHV6, H5 VDDS_DDR, H11 VDD_CORE, H13 VDD_MPU, H14 VDDSHV4, H15 VDDS_PLL_MPU, J5 VDDS_DDR, J12 VDD_CORE, J13 VDD_MPU, J14 VDDSHV4, K5 VDDS_DDR, K6 VDD_CORE, K8 VDD_CORE, K12 VDD_CORE, K13 VDDS, K14 VDDSHV5, L5 VDDS_DDR, L6 VDD_CORE, L7 VDD_CORE, L8 VDD_CORE, L9 VDD_CORE, L14 VDDSHV5, M5 VPP, M11 VDD_CORE, M13 VDD_CORE, N5 VDDSHV6, N6 VDDS, N8 VDD_CORE, N9 VDD_CORE, N12 VDD_CORE, N13 VDD_CORE, N15 VDDA3P3V_USB0, N16 VDDA1P8V_USB0, P5 VDDSHV6, P6 VDDSHV6, P7 VDDSHV1, P8 VDDSHV1, P9 VDDS, P10 VDDSHV2, P11 VDDSHV2, P12 VDDSHV3, P13 VDDSHV3, P14 VDDS, R10 VDDS_PLL_CORE_LCD, R11 VDDS_OSC, R15 VDDA3P3V_USB1, R16 VDDA1P8V_USB1
part B pins: A4 RTC_XTALOUT, A6 RTC_XTALIN, A11 TDO, A12 TCK, A15 XDMA_EVENT_INTR0, A16 SPI0_CS0, A17 SPI0_SCLK, B4 RTC_KALDO_ENN, B5 ~{RTC_PWRONRSTN}, B10 TRSTN, B11 TDI, B14 EMU1, B16 SPI0_D1, B17 SPI0_D0, B18 EXTINTN, C5 EXT_WAKEUP, C11 TMS, C14 EMU0, C15 SPI0_CS1, C16 I2C0_SCL, C17 I2C0_SDA, C18 ECAP0_IN_PWM0_OUT, D14 XDMA_EVENT_INTR1, D15 UART1_TXD, D16 UART1_RXD, D17 UART1_RTSN, D18 UART1_CTSN, E15 UART0_RXD, E16 UART0_TXD, E17 UART0_RTSN, E18 UART0_CTSN, F15 USB1_DRVVBUS, F16 USB0_DRVVBUS, M15 USB0_CE, N17 USB0_DP, N18 USB0_DM, P15 USB0_VBUS, P16 USB0_ID, P17 USB1_ID, P18 USB1_CE, R17 USB1_DP, R18 USB1_DM, T18 USB1_VBUS, U11 XTALOUT, V10 XTALIN
part C pins: A7 AIN3, A8 AIN6, A9 VREFN, B6 AIN0, B7 AIN2, B8 AIN5, B9 VREFP, C7 AIN1, C8 AIN4, C9 AIN7, R1 LCD_DATA0, R2 LCD_DATA1, R3 LCD_DATA2, R4 LCD_DATA3, R5 LCD_HSYNC, R6 LCD_AC_BIAS_EN, T1 LCD_DATA4, T2 LCD_DATA5, T3 LCD_DATA6, T4 LCD_DATA7, T5 LCD_DATA15, U1 LCD_DATA8, U2 LCD_DATA9, U3 LCD_DATA10, U4 LCD_DATA11, U5 LCD_VSYNC, V2 LCD_DATA12, V3 LCD_DATA13, V4 LCD_DATA14, V5 LCD_PCLK
part D pins: B1 DDR_A5, B2 ~{DDR_WEN}, B3 DDR_BA2, C1 DDR_A9, C2 DDR_A4, C3 DDR_A3, C4 DDR_BA0, D1 DDR_CKN, D2 DDR_CK, D3 DDR_A15, D4 DDR_A8, D5 DDR_A6, E1 DDR_BA1, E2 DDR_A7, E3 DDR_A12, E4 DDR_A2, F1 ~{DDR_CASN}, F2 DDR_A11, F3 DDR_A0, F4 DDR_A10, G1 DDR_ODT, G2 ~{DDR_RESETN}, G3 DDR_CKE, G4 ~{DDR_RASN}, H1 DDR_A1, H2 DDR_CSN0, H3 DDR_A13, H4 DDR_A14, J1 DDR_D8, J2 DDR_DQM1, J3 DDR_VTP, J4 DDR_VREF, K1 DDR_D9, K2 DDR_D10, K3 DDR_D11, K4 DDR_D12, L1 DDR_DQS1, L2 DDR_DQSN1, L3 DDR_D13, L4 DDR_D14, M1 DDR_D15, M2 DDR_DQM0, M3 DDR_D0, M4 DDR_D1, N1 DDR_D2, N2 DDR_D3, N3 DDR_D4, N4 DDR_D5, P1 DDR_DQS0, P2 DDR_DQSN0, P3 DDR_D6, P4 DDR_D7
part E pins: R7 GPMC_ADVN_ALE, R8 GPMC_AD2, R9 GPMC_AD6, R12 GPMC_AD13, R13 GPMC_A0, R14 GPMC_A4, T6 GPMC_BEN0_CLE, T7 GPMC_OEN_REN, T8 GPMC_AD3, T9 GPMC_AD7, T10 GPMC_AD9, T11 GPMC_AD10, T12 GPMC_AD12, T13 GPMC_CSN3, T14 GPMC_A3, T15 GPMC_A7, T16 GPMC_A10, T17 GPMC_WAIT0, U6 GPMC_WEN, U7 GPMC_AD0, U8 GPMC_AD4, U9 GPMC_CSN1, U10 GPMC_AD8, U12 GPMC_AD11, U13 GPMC_AD15, U14 GPMC_A2, U15 GPMC_A6, U16 GPMC_A9, U17 GPMC_WPN, U18 GPMC_BEN1, V6 GPMC_CSN0, V7 GPMC_AD1, V8 GPMC_AD5, V9 GPMC_CSN2, V12 GPMC_CLK, V13 GPMC_AD14, V14 GPMC_A1, V15 GPMC_A5, V16 GPMC_A8, V17 GPMC_A11
part F pins: A3 RESERVED, A10 WARMRSTN, A13 MCASP0_ACLKX, A14 MCASP0_AHCLKX, B12 MCASP0_ACLKR, B13 MCASP0_FSX, B15 PWRONRSTN, C6 PMIC_POWER_EN, C12 MCASP0_AHCLKR, C13 MCASP0_FSR, D12 MCASP0_AXR0, D13 MCASP0_AXR1, F17 MMC0_DAT3, F18 MMC0_DAT2, G15 MMC0_DAT1, G16 MMC0_DAT0, G17 MMC0_CLK, G18 MMC0_CMD, H16 MII1_COL, H17 MII1_CRS, H18 RMII1_REF_CLK, J15 MII1_RX_ER, J16 MII1_TX_EN, J17 MII1_RX_DV, J18 MII1_TXD3, K15 MII1_TXD2, K16 MII1_TXD1, K17 MII1_TXD0, K18 MII1_TX_CLK, L15 MII1_RXD1, L16 MII1_RXD2, L17 MII1_RXD3, L18 MII1_RX_CLK, M16 MII1_RXD0, M17 MDIO, M18 MDC
part G pins: A1 VSS, A5 VSS_RTC, A18 VSS, E8 VSSA_ADC, F8 VSS, G8 VSS, G9 VSS, G11 VSS, G12 VSS, H6 VSS, H7 VSS, H8 VSS, H9 VSS, H10 VSS, H12 VSS, J6 VSS, J7 VSS, J8 VSS, J9 VSS, J10 VSS, J11 VSS, K7 VSS, K9 VSS, K10 VSS, K11 VSS, L10 VSS, L11 VSS, L12 VSS, L13 VSS, M6 VSS, M7 VSS, M8 VSS, M9 VSS, M10 VSS, M12 VSS, M14 VSSA_USB, N7 VSS, N10 VSS, N11 VSS, N14 VSSA_USB, V1 VSS, V11 VSS_OSC, V18 VSS

## ARG03FTC2700
designator R?, comment 270R
270Ω 0603 Chip Resistor - Surface Mount ROHS; Manufacturer: Viking Tech; Manufacturer Part Number: ARG03FTC2700; ComponentLink1Description: LCSC; ComponentLink1URL: https://lcsc.com/product-detail/Chip-span-style-background-color-ff0-Resistor-span-Surface-Mount_Viking-Tech-ARG03FTC2700_C217921.html; Footprint: 0603
footprint Res0603
pins: 1, 2

## AS0B821-S78B-7H
designator J?
Conn Card Edge 314 POS 0.5mm Solder RA SMD Carrier T/R; Manufacturer: Foxconn; Manufacturer Part Number: AS0B821-S78B-7H; Supplier 1: Avnet; RoHS: No; Category: Card Edge Connectors; Pricing 1: 4200=2.03770, 6300=2.00900, 10500=1.95160, 21000=1.90855, 42000=1.83680, 210000=1.79375, 420000=1.75070 (USD); Lead Free: Lead Free; Supplier Part Number 1: AS0B821-S78B-7H
footprint AS0B821-S78B-7H
part A pins: 1, 2, 3, 4, 5, 6, 7, 8, 9, 10, 11, 12, 13, 14, 15, 16, 17, 18, 19, 20, 21, 22, 23, 24, 25, 26, 27, 28, 29, 30, 31, 32, 33, 34, 35, 36, 37, 38, 39, 40, 41, 42, 43, 44, 45, 46, 47, 48, 49, 50, 51, 52, 53, 54, 55, 56, 57, 58, 59, 60
part B pins: 61, 62, 63, 64, 65, 66, 67, 68, 69, 70, 71, 72, 73, 74, 75, 76, 77, 78, 79, 80, 81, 82, 83, 84, 85, 86, 87, 88, 89, 90, 91, 92, 93, 94, 95, 96, 97, 98, 99, 100, 101, 102, 103, 104, 105, 106, 107, 108, 109, 110, 111, 112, 113, 114, 115, 116, 117, 118, 119, 120, 121, 122, 123, 124, 125
part C pins: 133, 134, 135, 136, 137, 138, 139, 140, 141, 142, 143, 144, 145, 146, 147, 148, 149, 150, 151, 152, 153, 154, 155, 156, 157, 158, 159, 160, 161, 162, 163, 164, 165, 166, 167, 168, 169, 170, 171, 172, 173, 174, 175, 176, 177, 178, 179, 180, 181, 182, 183, 184, 185, 186, 187, 188, 189, 190, 191, 192, 193, 194, 195, 196, 197, 198, 199, 200, 201, 202, 203, 204, 205, 206, 207, 208, 209, 210
part D pins: 211, 212, 213, 214, 215, 216, 217, 218, 219, 220, 221, 222, 223, 224, 225, 226, 227, 228, 229, 230, 231, 232, 233, 234, 235, 236, 237, 238, 239, 240, 241, 242, 243, 244, 245, 246, 247, 248, 249, 250, 251, 252, 253, 254, 255, 256, 257, 258, 259, 260, 261, 262, 263, 264, 265, 266, 267, 268, 269, 270, 271, 272, 273, 274, 275, 276, 277, 278, 279, 280, 281
part E pins: E1, E2, E3, E4, MP1, MP2

## AVE107M06D16T-F
designator C?, comment 100uF
CAP ALUM 100UF 20% 6.3V SMD; Manufacturer: Cornell Dubilier; Manufacturer Part Number: AVE107M06D16T-F; Dielectric Material: Aluminium; Ripple Current: 120mA; ESR (Equivalent Series Resistance): 4.64R; Life (Hours): 2000Hour; Leakage Current: 6.3uA; Polarity: Polar; Dissipation Factor: 0.28%; Lead Length: 2.7mm; Supplier 1: Mouser; RoHS: Yes; Category: Aluminum Electrolytic Capacitors; Stock 1: 2987; Pricing 1: 1=0.56000, 10=0.39300, 50=0.27500, 100=0.23200, 500=0.17400, 1000=0.15000, 2000=0.13800, 10000=0.13800 (USD); Mount: Surface Mount,PCB; Case/Package: Radial; Min Operating Temperature: -40°C; Max Operating Temperature: 85°C; Tolerance: 20%; Capacitance: 100uF; Voltage Rating: 6.3V; Packaging: Tape and Reel; Package Quantity: 1000; Voltage Rating (DC): 6.3V; Ripple Current (AC): 120mA; Termination: SMD/SMT; Voltage: 6.3V; Series: AVE; Construction: Cylindrical; Diameter: 6.3mm; Length: 5.3mm; Height: 5.3mm; Height - Seated (Max): 0.209inch; Lead Pitch: 2mm; Radiation Hardening: No; REACH SVHC: Unknown; Lead Free: Lead Free; RoHS Compliant: Yes; ComponentLink1URL: https://datasheet.ciiva.com/8063/1749467-8063783.pdf?src-supplier=Element14; ComponentLink1Description: https://datasheet.ciiva.com/8063/1749467-8063783.pdf?src-supplier=Element14; ComponentLink2URL: https://datasheet.ciiva.com/23811/1749467-23811497.pdf?src-supplier=Newark; ComponentLink2Description: https://datasheet.ciiva.com/23811/1749467-23811497.pdf?src-supplier=Newark; ComponentLink3URL: https://datasheet.ciiva.com/7461/1749467-7461178.pdf?src-supplier=Newark; ComponentLink3Description: https://datasheet.ciiva.com/7461/1749467-7461178.pdf?src-supplier=Newark; ComponentLink4URL: https://datasheet.ciiva.com/96/ave-96171.pdf?src-supplier=Digi-Key; ComponentLink4Description: https://datasheet.ciiva.com/96/ave-96171.pdf?src-supplier=Digi-Key; ComponentLink5URL: https://datasheet.ciiva.com/14593/70190016-14593613.pdf?src-supplier=Allied+Electronics; ComponentLink5Description: https://datasheet.ciiva.com/14593/70190016-14593613.pdf?src-supplier=Allied+Electronics; ComponentLink6URL: https://datasheet.ciiva.com/96/ave-96170.pdf?src-supplier=Digi-Key; ComponentLink6Description: https://datasheet.ciiva.com/96/ave-96170.pdf?src-supplier=Digi-Key; ComponentLink7URL: https://datasheet.ciiva.com/96/ave-96172.pdf?src-supplier=Digi-Key; ComponentLink7Description: https://datasheet.ciiva.com/96/ave-96172.pdf?src-supplier=Digi-Key; Supplier Part Number 1: 598-AVE107M06D16T-F
footprint AVE107M06D16T-F
pins: 1, 2

## C0603C223K1RAC7867
designator C?, comment 22nF
CAP CER 22nF 100V X7R 0603; Manufacturer: KEMET; Manufacturer Part Number: C0603C223K1RACTU; Dielectric Material: Ceramic; Tolerance: 10%; Dissipation Factor: 2.5%; Supplier 1: Arrow Electronics; RoHS: Yes; Category: Ceramic Capacitors; Stock 1: 108000; Pricing 1: 4000=0.03660 (USD); Mount: Surface Mount,PCB; Case/Package: 0603; Number of Pins: 2; Case Code (Metric): 1608; Case Code (Imperial): 0603; Min Operating Temperature: -55°C; Max Operating Temperature: 125°C; Capacitance: 22nF; Dielectric: X7R; Package Quantity: 4000; Voltage Rating: 100V; Packaging: Tape and Reel; Voltage Rating (DC): 100V; Termination: SMD/SMT; Series: C; Construction: Flat; Voltage: 100V; Length: 1.6mm; Width: 0.031inch; Height: 0.8mm; Thickness: 0.034inch; Depth: 0.8mm; Lead Pitch: 0.7mm; Radiation Hardening: No; RoHS Compliant: Yes; REACH SVHC: No SVHC; ComponentLink1URL: https://datasheet.ciiva.com/5416/kem-c1002-x7r-smd-5416629.pdf?src-supplier=Mouser; ComponentLink1Description: https://datasheet.ciiva.com/5416/kem-c1002-x7r-smd-5416629.pdf?src-supplier=Mouser; ComponentLink2URL: https://datasheet.ciiva.com/18192/getdatasheetpartid-306025-18192903.pdf?src-supplier=Verical; ComponentLink2Description: https://datasheet.ciiva.com/18192/getdatasheetpartid-306025-18192903.pdf?src-supplier=Verical; ComponentLink3URL: https://datasheet.ciiva.com/18101/getdatasheetpartid-38414-18101194.pdf?src-supplier=Verical; ComponentLink3Description: https://datasheet.ciiva.com/18101/getdatasheetpartid-38414-18101194.pdf?src-supplier=Verical; Supplier Part Number 1: C0603C223K1RACTU
footprint Cap0603
pins: 1, 2

## C1005X5R1V225KT000E
designator C?, comment 2.2uF
CAP CER 2.2UF 35V X5R 0402; Manufacturer: TDK; Tolerance: ±10%; Capacitance: 2.2uF; Voltage - Rated: 35V; Temperature Coefficient: X5R
footprint Cap0402
pins: 1, 2

## C1608X5R1E106M080AC
designator C?, comment 10uF
CAP CER 10UF 25V X5R 0603; Manufacturer: TDK; Manufacturer Part Number: C1608X5R1E106M080AC; Dielectric Material: Ceramic; Tolerance: 20%; Supplier 1: Digi-Key; Stock 1: 61681; Pricing 1: 1=0.96, 10=0.704, 100=0.483, 500=0.38238, 1000=0.322 (USD); Mount: Surface Mount; Case/Package: 0603; Weight: 7.1E-05oz; Case Code (Imperial): 0603; Case Code (Metric): 1608; Min Operating Temperature: -55°C; Max Operating Temperature: 85°C; Capacitance: 10uF; Packaging: Tape and Reel; Voltage Rating: 25V; Voltage Rating (DC): 25V; Termination: SMD/SMT; Package Quantity: 1; Dielectric: X5R; Composition: Ceramic; Length: 1.6mm; Height: 0.8mm; Width: 0.8mm; Thickness: 0.039inch; Depth: 0.8mm; Lead Free: Lead Free; REACH SVHC: No SVHC; Supplier Part Number 1: 445-9015-1-ND
footprint Cap0603
pins: 1, 2

## C2012Y5V1A106Z
designator C?, comment 10uF
CAP CER 10UF 10V Y5V 0805; Manufacturer: TDK; Manufacturer Part Number: C2012Y5V1A106Z; Dielectric Material: Ceramic; Tolerance: 80%; Supplier 1: Farnell; RoHS: Yes; Category: Ceramic Capacitors; Pricing 1: 1=0.04900, 250=0.03500, 500=0.02700, 1000=0.02400, 5000=0.01500 (GBP); Mount: Surface Mount; Case/Package: 0805; Number of Pins: 2; Case Code (Imperial): 0805; Case Code (Metric): 2012; Min Operating Temperature: -30°C; Max Operating Temperature: 85°C; Capacitance: 10uF; Voltage Rating: 10V; Packaging: Tape and Reel; Voltage Rating (DC): 10V; Package Quantity: 1; Dielectric: Y5V; Termination: SMD/SMT; Resistor Type: Ceramic; Length: 2mm; Width: 1.25mm; Height: 1.25mm; Thickness: 0.057inch; Depth: 1.25mm; Radiation Hardening: No; Lead Free: Lead Free; REACH SVHC: No SVHC; ComponentLink1URL: https://datasheet.ciiva.com/16384/e412-c-16384533.pdf?src-supplier=Future+Electronics; ComponentLink1Description: https://datasheet.ciiva.com/16384/e412-c-16384533.pdf?src-supplier=Future+Electronics; ComponentLink2URL: https://datasheet.ciiva.com/6144/1744655-6144488.pdf?src-supplier=Farnell; ComponentLink2Description: https://datasheet.ciiva.com/6144/1744655-6144488.pdf?src-supplier=Farnell; ComponentLink3URL: https://datasheet.ciiva.com/134/c-series-generalappl-b11-134299.pdf?src-supplier=Digi-Key; ComponentLink3Description: https://datasheet.ciiva.com/134/c-series-generalappl-b11-134299.pdf?src-supplier=Digi-Key; ComponentLink4URL: https://datasheet.ciiva.com/134/c-series-generalappl-b11-134300.pdf?src-supplier=Digi-Key; ComponentLink4Description: https://datasheet.ciiva.com/134/c-series-generalappl-b11-134300.pdf?src-supplier=Digi-Key; ComponentLink5URL: https://datasheet.ciiva.com/7770/1744655-7770204.pdf?src-supplier=Element14; ComponentLink5Description: https://datasheet.ciiva.com/7770/1744655-7770204.pdf?src-supplier=Element14; ComponentLink6URL: https://datasheet.ciiva.com/134/c-series-generalappl-b11-134301.pdf?src-supplier=Digi-Key; ComponentLink6Description: https://datasheet.ciiva.com/134/c-series-generalappl-b11-134301.pdf?src-supplier=Digi-Key; ComponentLink7URL: https://datasheet.ciiva.com/7770/1571323-7770205.pdf?src-supplier=Element14; ComponentLink7Description: https://datasheet.ciiva.com/7770/1571323-7770205.pdf?src-supplier=Element14; ComponentLink8URL: https://datasheet.ciiva.com/15192/getdatasheetpartid-100734-15192189.pdf?src-supplier=Verical; ComponentLink8Description: https://datasheet.ciiva.com/15192/getdatasheetpartid-100734-15192189.pdf?src-supplier=Verical; ComponentLink9URL: https://datasheet.ciiva.com/15918/e4112-c1005-15918669.pdf?src-supplier=Onlinecomponents.com; ComponentLink9Description: https://datasheet.ciiva.com/15918/e4112-c1005-15918669.pdf?src-supplier=Onlinecomponents.com; Supplier Part Number 1: 2112710
footprint Cap0805 (SMD 0805)
pins: 1, 2

## CC0603JRNPO9BN200
designator C?, comment 20pF
CAP CER 20PF 50V C0G/NPO 0603; Manufacturer: Yageo; Manufacturer Part Number: CC0603JRNPO9BN200; Tolerance: 5%; Dielectric: C0G; Supplier 1: Digi-Key; Stock 1: 259568; Pricing 1: 1=0.1, 10=0.048, 100=0.0214, 500=0.01526, 1000=0.01198 (USD); Mount: Surface Mount; Case/Package: 0603; Number of Pins: 2; Weight: 7.1E-05oz; Case Code (Imperial): 0603; Case Code (Metric): 1608; Min Operating Temperature: -55°C; Max Operating Temperature: 125°C; Capacitance: 20pF; Package Quantity: 4000; Voltage Rating (DC): 50V; Packaging: Tape and Reel; Voltage Rating: 50V; Termination: SMD/SMT; Composition: Ceramic; Length: 1.6mm; Width: 0.8mm; Thickness: 0.035inch; Depth: 0.8mm; REACH SVHC: Unknown; Lead Free: Lead Free; ComponentLink1URL: http://www.farnell.com/datasheets/1132289.pdf?src-supplier=Element14; ComponentLink1Description: http://www.farnell.com/datasheets/1132289.pdf?src-supplier=Element14; ComponentLink2URL: http://www.yageo.com/documents/recent/UPY-GP_NP0_16V-to-50V_16.pdf?src-supplier=Digi-Key; ComponentLink2Description: http://www.yageo.com/documents/recent/UPY-GP_NP0_16V-to-50V_16.pdf?src-supplier=Digi-Key; Supplier Part Number 1: 311-1424-6-ND
footprint Cap0603
pins: 1, 2

## CC0603KRX7R0BB104
designator C?, comment 0.1uF
CAP CER 0.1UF 100V X7R 0603; Manufacturer: Yageo; Manufacturer Part Number: CC0603KRX7R0BB104; Capacitance: 100nF; Tolerance: 10%; Supplier 1: Digi-Key; RoHS: Yes; Category: Ceramic Capacitors; Stock 1: 60476; Pricing 1: 1=0.19000, 10=0.13500, 50=0.07680, 100=0.06370, 500=0.04466, 1000=0.03696 (USD); Mount: Surface Mount; Case/Package: 0603; Case Code (Metric): 1608; Case Code (Imperial): 0603; Weight: 7.1E-05oz; Min Operating Temperature: -55°C; Max Operating Temperature: 125°C; Package Quantity: 4000; Voltage Rating: 100V; Packaging: Tape and Reel; Dielectric: X7R; Termination: SMD/SMT; Resistor Type: Ceramic; Voltage Rating (DC): 100V; Series: CC; Length: 0.063inch; Width: 0.031inch; Thickness: 0.035inch; Depth: 0.8mm; Lead Free: Lead Free; RoHS Compliant: Yes; ComponentLink1URL: https://datasheet.ciiva.com/6277/mlccorderingcode-6277030.pdf?src-supplier=Digi-Key; ComponentLink1Description: https://datasheet.ciiva.com/6277/mlccorderingcode-6277030.pdf?src-supplier=Digi-Key; ComponentLink2URL: https://datasheet.ciiva.com/6277/mlccorderingcode-6277081.pdf?src-supplier=Digi-Key; ComponentLink2Description: https://datasheet.ciiva.com/6277/mlccorderingcode-6277081.pdf?src-supplier=Digi-Key; ComponentLink3URL: https://datasheet.ciiva.com/6277/mlccorderingcode-6277082.pdf?src-supplier=Digi-Key; ComponentLink3Description: https://datasheet.ciiva.com/6277/mlccorderingcode-6277082.pdf?src-supplier=Digi-Key; Supplier Part Number 1: 311-1523-1-ND
footprint Cap0603
pins: 1, 2

## CC0603KRX7R8BB102
designator C?, comment 1nF
CAP CER 0603 1nF 25 V ±10 % Tolerance X7R SMT; Manufacturer: Yageo; Manufacturer Part Number: CC0603KRX7R8BB102; Tolerance: 10%; Voltage Rating: 25V; Supplier 1: Arrow Electronics; RoHS: Yes; Category: Ceramic Capacitors; Stock 1: 974; Pricing 1: 1=0.07500, 10=0.04120, 25=0.04030, 100=0.02020, 250=0.02000, 500=0.01320 (USD); Mount: Surface Mount; Case/Package: 0603; Case Code (Imperial): 0603; Case Code (Metric): 1608; Weight: 7.1E-05oz; Min Operating Temperature: -55°C; Max Operating Temperature: 125°C; Capacitance: 1nF; Dielectric: X7R; Packaging: Tape and Reel; Voltage Rating (DC): 25V; Termination: SMD/SMT; Resistor Type: Ceramic; Series: CC; Construction: Flat; Length: 1.6mm; Width: 0.031inch; Height: 0.8mm; Thickness: 0.035inch; Depth: 0.8mm; Radiation Hardening: No; Lead Free: Lead Free; Halogen Free: Halogen Free; RoHS Compliant: Yes; ComponentLink1URL: https://datasheet.ciiva.com/13263/upy-gphc-x7r-6-3v-to-50v-8-12304-13263372.pdf?src-supplier=Mouser; ComponentLink1Description: https://datasheet.ciiva.com/13263/upy-gphc-x7r-6-3v-to-50v-8-12304-13263372.pdf?src-supplier=Mouser; Supplier Part Number 1: CC0603KRX7R8BB102
footprint Cap0603
pins: 1, 2

## CC0603KRX7R9BB222
designator C?, comment 2.2nF
CAP CER 2200PF 50V X7R 0603; Manufacturer: Yageo; Manufacturer Part Number: CC0603KRX7R9BB222; Tolerance: 10%; Insulation Resistance: 10GR; Dissipation Factor: 2.5%; Supplier 1: Arrow Electronics; RoHS: Yes; Category: Ceramic Capacitors; Stock 1: 84000; Pricing 1: 4000=0.01010, 8000=0.00890, 12000=0.00830, 40000=0.00750 (USD); Mount: Surface Mount; Case/Package: 0603; Number of Pins: 2; Case Code (Metric): 1608; Case Code (Imperial): 0603; Min Operating Temperature: -55°C; Max Operating Temperature: 125°C; Capacitance: 2.2nF; Dielectric: X7R; Package Quantity: 1; Voltage Rating: 50V; Packaging: Tape and Reel; Voltage Rating (DC): 50V; Termination: SMD/SMT; Resistor Type: Ceramic; Voltage: 50V; Series: CC; Length: 1.6mm; Width: 0.031inch; Height: 0.8mm; Thickness: 0.035inch; Depth: 0.8mm; Radiation Hardening: No; REACH SVHC: No SVHC; Lead Free: Lead Free; Halogen Free: Halogen Free; RoHS Compliant: Yes; ComponentLink1URL: https://datasheet.ciiva.com/23768/1079489-23768004.pdf?src-supplier=Newark; ComponentLink1Description: https://datasheet.ciiva.com/23768/1079489-23768004.pdf?src-supplier=Newark; ComponentLink2URL: https://datasheet.ciiva.com/11788/0900766b8079c870-11788403.pdf?src-supplier=RSComponents; ComponentLink2Description: https://datasheet.ciiva.com/11788/0900766b8079c870-11788403.pdf?src-supplier=RSComponents; ComponentLink3URL: https://datasheet.ciiva.com/26862/getdatasheetpartid-403587-26862854.pdf?src-supplier=Verical; ComponentLink3Description: https://datasheet.ciiva.com/26862/getdatasheetpartid-403587-26862854.pdf?src-supplier=Verical; ComponentLink4URL: https://datasheet.ciiva.com/8033/70765-8033863.pdf?src-supplier=Element14; ComponentLink4Description: https://datasheet.ciiva.com/8033/70765-8033863.pdf?src-supplier=Element14; ComponentLink5URL: https://datasheet.ciiva.com/7978/1489800-7978172.pdf?src-supplier=Element14; ComponentLink5Description: https://datasheet.ciiva.com/7978/1489800-7978172.pdf?src-supplier=Element14; ComponentLink6URL: https://datasheet.ciiva.com/28450/1489800-28450632.pdf?src-supplier=Element14; ComponentLink6Description: https://datasheet.ciiva.com/28450/1489800-28450632.pdf?src-supplier=Element14; ComponentLink7URL: https://datasheet.ciiva.com/155/mlccorderingcode-155921.pdf?src-supplier=Digi-Key; ComponentLink7Description: https://datasheet.ciiva.com/155/mlccorderingcode-155921.pdf?src-supplier=Digi-Key; ComponentLink8URL: https://datasheet.ciiva.com/155/mlccorderingcode-155920.pdf?src-supplier=Digi-Key; ComponentLink8Description: https://datasheet.ciiva.com/155/mlccorderingcode-155920.pdf?src-supplier=Digi-Key; ComponentLink9URL: https://datasheet.ciiva.com/155/mlccorderingcode-155922.pdf?src-supplier=Digi-Key; ComponentLink9Description: https://datasheet.ciiva.com/155/mlccorderingcode-155922.pdf?src-supplier=Digi-Key; ComponentLink10URL: https://datasheet.ciiva.com/8033/1489800-8033864.pdf?src-supplier=Element14; ComponentLink10Description: https://datasheet.ciiva.com/8033/1489800-8033864.pdf?src-supplier=Element14; ComponentLink11URL: https://datasheet.ciiva.com/8033/1489800-8033862.pdf?src-supplier=Element14; ComponentLink11Description: https://datasheet.ciiva.com/8033/1489800-8033862.pdf?src-supplier=Element14; Supplier Part Number 1: CC0603KRX7R9BB222
footprint Cap0603
pins: 1, 2